# Altium footprint library Robot.PcbLib: 113 footprints (part 8 of 8)
Each footprint in its own frame and in the unit in brackets; x right, y up, seen from the top. Pads: shape width x height; smd on the part's side, far side on the other; paste and mask are expansions set on the pad; w line width, h text height; cw(c..) or ccw(c..) is an arc to the next point about the centre after c.
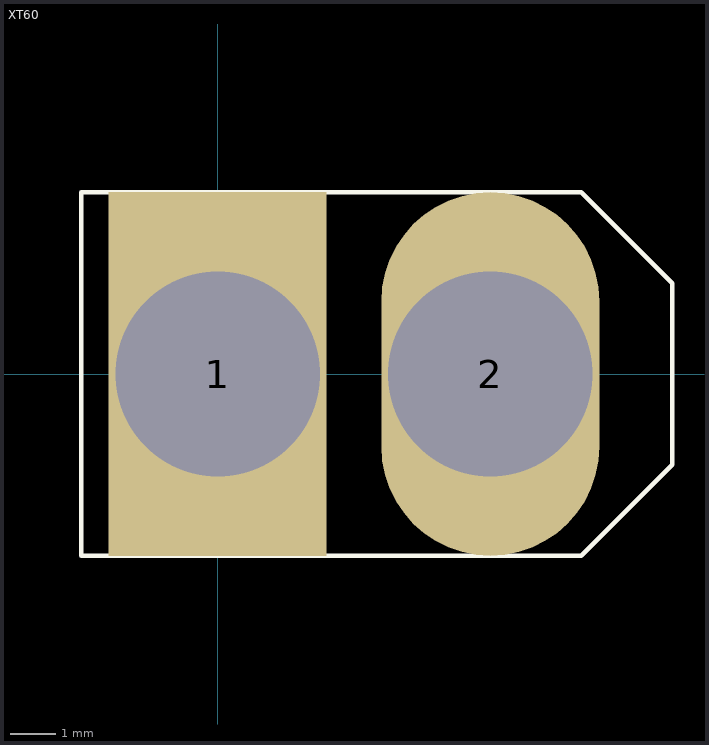
[diagram p7: the footprint, top view; thin cyan lines are the x and y axes]

## XT60 [mm] "Connecteur Batterie"
pads (2):
  rect 4.8x8 hole 4.5: 1(0,0)
  oval 4.8x8 hole 4.5: 2(6,0)
Top Overlay:
  lines w0.1: -3,-4 8,-4 10,-2 10,2 8,4 -3,4 -3,-4 ; -3,-4 -3,-4